# EAGLE library part 6130XX243121_613040243121 (library WR-PHD)
WR-PHD 2.54 mm Angled Dual Socket Header Article Properties Pins 4; 6; 8; 10; 12; 14; 16; 20; 22; 24; 26; 32; 34; 40; 64; 72 Material Properties Insulator Material PBT Insulator Flammability Rating UL94 V-0 Contact Material Copper Alloy Contact Plating Gold Contact Type Stamped General Information Operating Temperature -40 °C up to +105 °C Compliance Lead free / RoHS Pitch 2.54 mm Durability 25 Mating cycles Rows Dual Gender Socket Header Type Angled Electrical Properties Withstanding Voltage 500 V (AC) Contact Resistance 20 mΩ RISO 1000 MΩ CERTIFICATION UL Approval E323964 Packaging Properties Packaging Tray <https://www.we-online.com/components/media/o33216v209%20Family_WR-PHD_6130xx243121.jpg> Details see: www.we-online.com/en/components/products/PHD_2_54_ANGLED_DUAL_SOCKET_HEADER_6130XX243121 <www.we-online.com/catalog/PHD_2_54_ANGLED_DUAL_SOCKET_HEADER_6130XX243121/?utm_source=eagle_model&utm_medium=description_link&utm_campaign=eisos_eagle> Updated by Ella 2024-03-13 2024 (C) Würth Elektronik
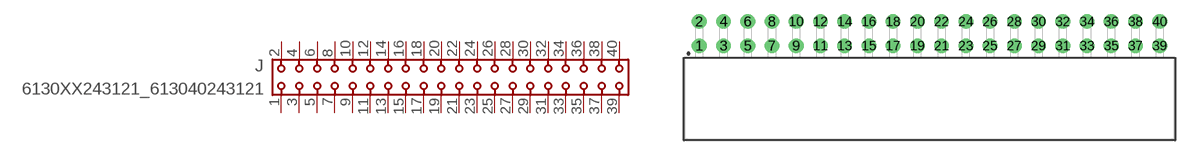
[diagram p111: symbol with the pads of 613040243121; footprint 613040243121]

Designator prefix J

## 6130XX243121_613040243121 (DATASHEET-URL: https://www.we-online.com/redexpert/spec/613040243121?ae; GENDER: Socket Header; IR: 3A; MOUNT: THT; PACKAGING: Tray; PART-NUMBER: 613040243121; PINS: 40; PITCH: 2.54 mm; ROWS: Dual; TYPE: Angled; VALUE: 613040243121)  [613040243121]
1  1  pas
2  2  pas
3  3  pas
4  4  pas
5  5  pas
6  6  pas
7  7  pas
8  8  pas
9  9  pas
10  10  pas
11  11  pas
12  12  pas
13  13  pas
14  14  pas
15  15  pas
16  16  pas
17  17  pas
18  18  pas
19  19  pas
20  20  pas
21  21  pas
22  22  pas
23  23  pas
24  24  pas
25  25  pas
26  26  pas
27  27  pas
28  28  pas
29  29  pas
30  30  pas
31  31  pas
32  32  pas
33  33  pas
34  34  pas
35  35  pas
36  36  pas
37  37  pas
38  38  pas
39  39  pas
40  40  pas

## Footprint 613040243121 (pad centres in mm)
WR-PHD 2.54 mm Angled Socket Header, 40 Pins
drill 1.02: 1 -24.13,5.61; 2 -24.13,8.15; 3 -21.59,5.61; 4 -21.59,8.15; 5 -19.05,5.61; 6 -19.05,8.15; 7 -16.51,5.61; 8 -16.51,8.15; 9 -13.97,5.61; 10 -13.97,8.15; 11 -11.43,5.61; 12 -11.43,8.15; 13 -8.89,5.61; 14 -8.89,8.15; 15 -6.35,5.61; 16 -6.35,8.15; 17 -3.81,5.61; 18 -3.81,8.15; 19 -1.27,5.61; 20 -1.27,8.15; 21 1.27,5.61; 22 1.27,8.15; 23 3.81,5.61; 24 3.81,8.15; 25 6.35,5.61; 26 6.35,8.15; 27 8.89,5.61; 28 8.89,8.15; 29 11.43,5.61; 30 11.43,8.15; 31 13.97,5.61; 32 13.97,8.15; 33 16.51,5.61; 34 16.51,8.15; 35 19.05,5.61; 36 19.05,8.15; 37 21.59,5.61; 38 21.59,8.15; 39 24.13,5.61; 40 24.13,8.15